# Altium footprint library Connector_SMD.PcbLib: 116 footprints (part 1 of 8)
Each footprint in its own frame and in the unit in brackets; x right, y up, seen from the top. Pads: shape width x height; smd on the part's side, far side on the other; paste and mask are expansions set on the pad; w line width, h text height; cw(c..) or ccw(c..) is an arc to the next point about the centre after c.
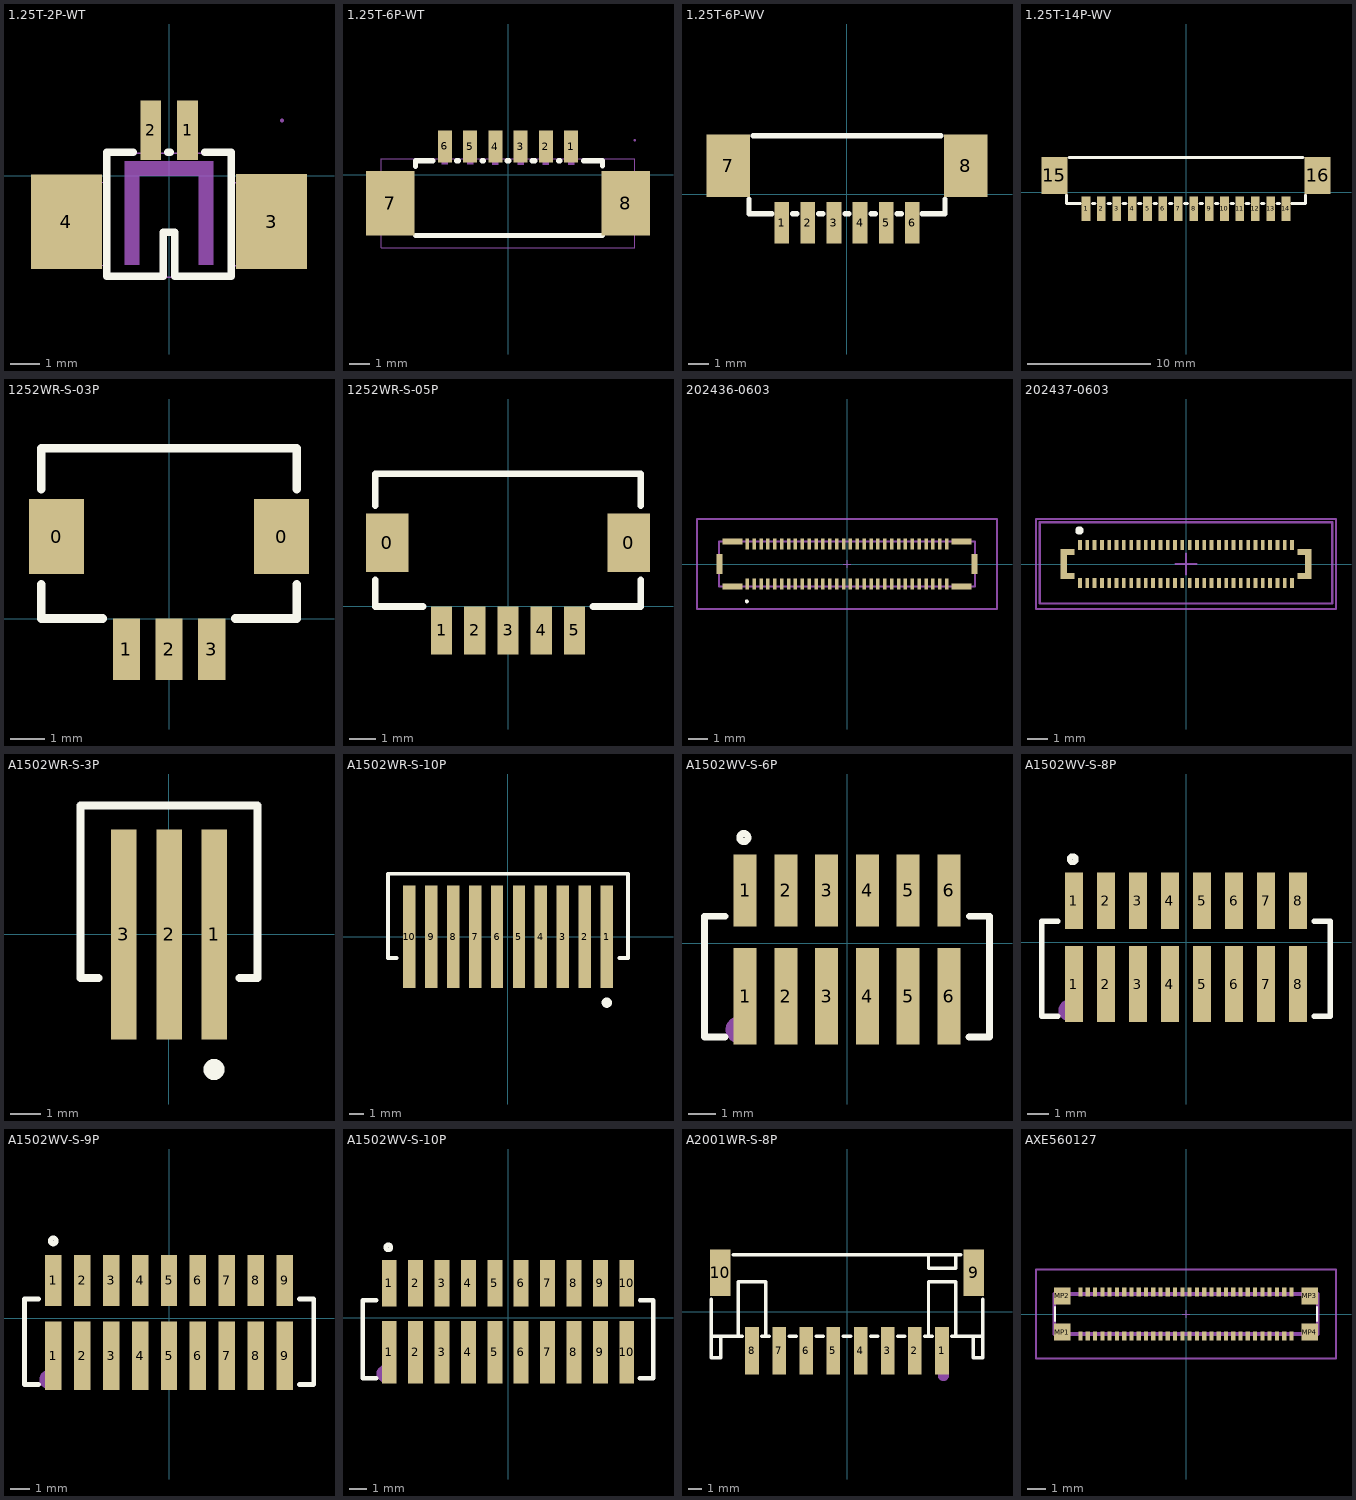
[diagram p0: the footprints below, top view; thin cyan lines are the x and y axes]

## 1.25T-2P-WT [mm]
pads (4):
  rect 0.7x2 smd paste+0 mask+0.051: 1(0.629,1.545) 2(-0.621,1.545)
  rect 2.4x3.2 smd paste+0 mask+0.051: 3(3.471,-1.544) 4(-3.471,-1.545)
Top Overlay:
  lines w0.254: -1.202,0.8 -2.1,0.8 -2.1,-3.4 -0.2,-3.4 -0.2,-1.9 0.2,-1.9 0.2,-3.4 2.1,-3.4 2.1,0.8 1.21,0.8 ; -0.04,0.8 0.047,0.8
Mechanical 6:
  region: 1,0.5 -1,0.5 -1,0 1,0
  region: -1.5,-3 -1.5,0.5 -1,0.5 -1,-3
  region: 1.5,-3 1.5,0.5 1,0.5 1,-3
Mechanical 15:
  region: -2.275,-2.373 -3.775,-2.373 -3.775,-0.473 -2.275,-0.473
  region: 3.775,-2.372 2.275,-2.372 2.275,-0.472 3.775,-0.472
  region: -0.471,0.679 -0.771,0.679 -0.771,1.879 -0.471,1.879
  region: 0.779,0.679 0.479,0.679 0.479,1.879 0.779,1.879
  region: 3.885,1.879 3.885,1.904 3.85,1.939 3.8,1.939 3.765,1.904 3.765,1.879 3.765,1.854 3.8,1.819 3.85,1.819 3.885,1.854 3.885,1.879
  lines w0.051: -2.126,-3.429 -2.126,-3.032 -3.58,-3.029 -3.627,-2.979 -3.626,-2.471 -3.697,-2.451 -3.755,-2.411 -3.797,-2.336 -3.814,-2.29 -3.826,-2.23 -3.826,-0.553 -3.815,-0.49 -3.798,-0.421 -3.756,-0.372 -3.694,-0.33 -3.632,-0.31 -3.623,-0.304 -3.623,-0.28 -3.574,-0.232 -2.131,-0.222 -2.125,0.772 2.121,0.766 2.125,-0.232 3.58,-0.23 3.629,-0.31 3.705,-0.331 3.753,-0.367 3.796,-0.42 3.825,-0.549 3.825,-2.231 3.815,-2.291 3.796,-2.352 3.754,-2.415 3.705,-2.45 3.632,-2.471 3.625,-2.473 3.625,-2.984 3.61,-2.994 3.6,-3.014 3.585,-3.025 3.555,-3.034 2.125,-3.032 2.124,-3.393 2.115,-3.411 2.102,-3.421 2.084,-3.427 0.154,-3.428 0.157,-3.429 -2.126,-3.429 ; -2.126,-3.429 -2.128,-3.429 -2.128,-3.431 -2.126,-3.431 -2.126,-3.429
3D body "CN2.stp": height 3.4, standoff 0, extent -3.825,-3.43 3.825,1.76

## 1.25T-6P-WT [mm]
pads (8):
  rect 0.7x1.6 smd paste+0 mask+0.051: 1(3.125,1.398) 2(1.875,1.398) 3(0.625,1.399) 4(-0.625,1.401) 5(-1.875,1.401) 6(-3.125,1.402)
  rect 2.4x3.2 smd paste+0 mask+0.051: 7(-5.825,-1.402) 8(5.825,-1.401)
Top Overlay:
  lines w0.254: -4.579,-3.001 4.671,-3.001 ; -4.579,0.424 -4.579,0.699 -3.71,0.699 ; -2.549,0.699 -2.455,0.699 ; -1.295,0.699 -1.208,0.699 ; -0.047,0.699 0.039,0.699 ; 1.202,0.699 1.332,0.699 ; 2.493,0.699 2.581,0.699 ; 3.742,0.699 4.671,0.699 4.671,0.431
Mechanical 15:
  region: -5.075,-2.402 -6.275,-2.402 -6.275,-0.402 -5.075,-0.402
  region: 6.275,-2.401 5.075,-2.401 5.075,-0.401 6.275,-0.401
  region: -0.475,0.511 -0.775,0.511 -0.775,1.711 -0.475,1.711
  region: -1.725,0.511 -2.025,0.511 -2.025,1.711 -1.725,1.711
  region: 3.275,0.508 2.975,0.508 2.975,1.708 3.275,1.708
  region: 2.025,0.508 1.725,0.508 1.725,1.708 2.025,1.708
  region: 0.775,0.509 0.475,0.509 0.475,1.709 0.775,1.709
  region: -2.975,0.512 -3.275,0.512 -3.275,1.712 -2.975,1.712
  region: 6.335,1.712 6.335,1.737 6.3,1.772 6.25,1.772 6.215,1.737 6.215,1.712 6.215,1.687 6.25,1.652 6.3,1.652 6.335,1.687 6.335,1.712
  lines w0.051: -6.275,-3.606 6.275,-3.606 6.275,0.794 -6.275,0.794 -6.275,-3.606
3D body "CN1.stp": height 3.4, standoff 0, extent -6.325,-3.484 6.325,1.706

## 1.25T-6P-WV [mm]
pads (8):
  rect 0.7x2 smd: 1(-3.125,-1.362) 2(-1.875,-1.362) 3(-0.625,-1.362) 4(0.625,-1.362) 5(1.875,-1.362) 6(3.125,-1.362)
  rect 2.1x3 smd: 7(-5.692,1.362) 8(5.692,1.362)
Top Overlay:
  lines w0.254: -4.7,-0.238 -4.7,-0.938 -3.6,-0.938 ; -4.5,2.8 4.5,2.8 ; -2.6,-0.938 -2.4,-0.938 ; -1.35,-0.938 -1.15,-0.938 ; -0.1,-0.938 0.1,-0.938 ; 1.15,-0.938 1.35,-0.938 ; 2.4,-0.938 2.6,-0.938 ; 3.6,-0.938 4.7,-0.938 4.7,-0.238
3D body "CN1.stp": height 4.7, standoff 0, extent -6.324,-1.337 6.324,2.762

## 1.25T-14P-WV [mm]
pads (16):
  rect 0.7x2 smd: 1(-8.125,-1.362) 2(-6.875,-1.362) 3(-5.625,-1.362) 4(-4.375,-1.362) 5(-3.125,-1.362) 6(-1.875,-1.362) 7(-0.625,-1.362) 8(0.625,-1.362) 9(1.875,-1.362) 10(3.125,-1.362) 11(4.375,-1.362) 12(5.625,-1.362) 13(6.875,-1.362) 14(8.125,-1.362)
  rect 2.1x3 smd: 15(-10.692,1.362) 16(10.692,1.362)
Top Overlay:
  lines w0.254: -9.7,-0.238 -9.7,-0.938 -8.6,-0.938 ; -9.5,2.8 9.5,2.8 ; -7.6,-0.938 -7.4,-0.938 ; -6.35,-0.938 -6.15,-0.938 ; -5.1,-0.938 -4.9,-0.938 ; -3.85,-0.938 -3.65,-0.938 ; -2.6,-0.938 -2.4,-0.938 ; -1.35,-0.938 -1.15,-0.938 ; -0.1,-0.938 0.1,-0.938 ; 1.15,-0.938 1.35,-0.938 ; 2.4,-0.938 2.6,-0.938 ; 3.65,-0.938 3.85,-0.938 ; 4.9,-0.938 5.1,-0.938 ; 6.15,-0.938 6.35,-0.938 ; 7.4,-0.938 7.6,-0.938 ; 8.6,-0.938 9.7,-0.938 9.7,-0.238
3D body "CN3.stp": height 4.5, standoff 0, extent -11.275,-1.362 11.275,2.538

## 1252WR-S-03P [mm]
pads (5):
  rect 1.6x2.2 smd: 0(-3.3,2.4) 0(3.3,2.4)
  rect 0.8x1.8 smd: 1(-1.25,-0.9) 2(0,-0.9) 3(1.25,-0.9)
Top Overlay:
  lines w0.254: -3.75,1 -3.75,0 -1.95,0 ; -3.75,3.8 -3.75,5 3.75,5 3.75,3.8 ; 1.95,0 3.75,0 3.75,1

## 1252WR-S-05P [mm]
pads (7):
  rect 1.6x2.2 smd: 0(-4.55,2.4) 0(4.55,2.4)
  rect 0.8x1.8 smd: 1(-2.5,-0.9) 2(-1.25,-0.9) 3(0,-0.9) 4(1.25,-0.9) 5(2.5,-0.9)
Top Overlay:
  lines w0.254: -5,1 -5,0 -3.2,0 ; -5,3.8 -5,5 5,5 5,3.8 ; 3.2,0 5,0 5,1

## 202436-0603 [mm]
pads (66):
  rect 0.18x0.55 smd: 1(-5.075,-1.025) 2(-5.075,1.025) 3(-4.725,-1.025) 4(-4.725,1.025) 5(-4.375,-1.025) 6(-4.375,1.025) 7(-4.025,-1.025) 8(-4.025,1.025) 9(-3.675,-1.025) 10(-3.675,1.025) 11(-3.325,-1.025) 12(-3.325,1.025) 13(-2.975,-1.025) 14(-2.975,1.025) 15(-2.625,-1.025) 16(-2.625,1.025) 17(-2.275,-1.025) 18(-2.275,1.025) 19(-1.925,-1.025) 20(-1.925,1.025) 21(-1.575,-1.025) 22(-1.575,1.025) 23(-1.225,-1.025) 24(-1.225,1.025) 25(-0.875,-1.025) 26(-0.875,1.025) 27(-0.525,-1.025) 28(-0.525,1.025) 29(-0.175,-1.025) 30(-0.175,1.025) 31(0.175,-1.025) 32(0.175,1.025) 33(0.525,-1.025) 34(0.525,1.025) 35(0.875,-1.025) 36(0.875,1.025) 37(1.225,-1.025) 38(1.225,1.025) 39(1.575,-1.025) 40(1.575,1.025) 41(1.925,-1.025) 42(1.925,1.025) 43(2.275,-1.025) 44(2.275,1.025) 45(2.625,-1.025) 46(2.625,1.025) 47(2.975,-1.025) 48(2.975,1.025) 49(3.325,-1.025) 50(3.325,1.025) 51(3.675,-1.025) 52(3.675,1.025) 53(4.025,-1.025) 54(4.025,1.025) 55(4.375,-1.025) 56(4.375,1.025) 57(4.725,-1.025) 58(4.725,1.025) 59(5.075,-1.025) 60(5.075,1.025)
  rect 1x0.3 smd: 61(5.83,-1.15) 62(5.83,1.15) 63(-5.83,-1.15) 64(-5.83,1.15)
  rect 0.3x1 smd: 65(6.485,0) 66(-6.485,0)
Top Overlay:
  lines w0.1: -5.1,-1.95 ccw(c-5.1,-1.9) -5.1,-1.85 ccw(c-5.1,-1.9) -5.1,-1.95
Mechanical 6:
  lines w0.1: -6.525,-1.15 6.525,-1.15 6.525,1.15 -6.525,1.15 -6.525,-1.15
Mechanical 7:
  lines w0.1: -7.635,-2.3 7.635,-2.3 7.635,2.3 -7.635,2.3 -7.635,-2.3
Mechanical 8:
  lines w0.025: -0.2,0 0.2,0 ; 0,-0.2 0,0.2
3D body "202436-0603.stp": height 0.88, standoff 0, extent -6.605,-1.282 6.605,1.282

## 202437-0603 [mm]
pads (66):
  rect 0.18x0.485 smd: 1(-5.075,0.908) 2(-5.075,-0.907) 3(-4.725,0.908) 4(-4.725,-0.907) 5(-4.375,0.908) 6(-4.375,-0.907) 7(-4.025,0.908) 8(-4.025,-0.907) 9(-3.675,0.908) 10(-3.675,-0.907) 11(-3.325,0.908) 12(-3.325,-0.907) 13(-2.975,0.908) 14(-2.975,-0.907) 15(-2.625,0.908) 16(-2.625,-0.907) 17(-2.275,0.908) 18(-2.275,-0.907) 19(-1.925,0.908) 20(-1.925,-0.907) 21(-1.575,0.908) 22(-1.575,-0.907) 23(-1.225,0.908) 24(-1.225,-0.907) 25(-0.875,0.908) 26(-0.875,-0.907) 27(-0.525,0.908) 28(-0.525,-0.907) 29(-0.175,0.908) 30(-0.175,-0.907) 31(0.175,0.908) 32(0.175,-0.907) 33(0.525,0.908) 34(0.525,-0.907) 35(0.875,0.908) 36(0.875,-0.907) 37(1.225,0.908) 38(1.225,-0.907) 39(1.575,0.908) 40(1.575,-0.907) 41(1.925,0.908) 42(1.925,-0.907) 43(2.275,0.908) 44(2.275,-0.907) 45(2.625,0.908) 46(2.625,-0.907) 47(2.975,0.908) 48(2.975,-0.907) 49(3.325,0.908) 50(3.325,-0.907) 51(3.675,0.908) 52(3.675,-0.907) 53(4.025,0.908) 54(4.025,-0.907) 55(4.375,0.908) 56(4.375,-0.907) 57(4.725,0.908) 58(4.725,-0.907) 59(5.075,0.908) 60(5.075,-0.907)
  rect 0.31x1.42 smd: 61(-5.85,0) 62(5.85,0)
  rect 0.36x0.28 smd: 61(-5.515,-0.57) 61(-5.515,0.57) 62(5.515,-0.57) 62(5.515,0.57)
Top Overlay:
  lines w0.2: -5.2,1.6 cw(c-5.1,1.6) -5,1.6 cw(c-5.1,1.6) -5.2,1.6
Mechanical 15:
  lines w0.1: -0.5,0 0.5,0 ; 0,-0.5 0,0.5 ; -7,-1.9 7,-1.9 7,2 -7,2 -7,-1.9
Mechanical 20:
  lines w0.1: -7.18,-2.15 -7.18,2.15 7.18,2.15 7.18,-2.15 -7.18,-2.15
3D body "202437-0603.stp": height 0.7, standoff -0.02, extent -5.855,-1 5.855,1

## A1502WR-S-3P [mm]
pads (3):
  rect 0.85x7 smd paste-1 mask+0.102: 1(1.5,0) 2(0,0) 3(-1.5,0)
Top Overlay:
  circle w0.5: c1.5,-4.5 r0.1
  lines w0.254: -2.35,-1.45 -2.95,-1.45 -2.95,4.3 2.95,4.3 2.95,-1.45 2.35,-1.45
Top Paste:
  rectangle: -1.925,-3.5 -1.075,-0.95
  rectangle: -1.925,0.05 -1.075,3.5
  rectangle: -0.425,-3.5 0.425,-0.95
  rectangle: -0.425,0.05 0.425,3.5
  rectangle: 1.075,0.05 1.925,3.5
  rectangle: 1.075,-3.5 1.925,-0.95
Top Solder:
  rectangle: 0.975,-3.6 2.025,-0.85
  rectangle: 0.975,-0.05 2.025,3.6
  rectangle: -0.525,-0.05 0.525,3.6
  rectangle: -0.525,-3.6 0.525,-0.85
  rectangle: -2.025,-0.05 -0.975,3.6
  rectangle: -2.025,-3.6 -0.975,-0.85

## A1502WR-S-10P [mm]
pads (10):
  rect 0.85x7 smd paste-1 mask+0.102: 1(6.75,0)
  rect 0.85x7 smd paste-1: 2(5.25,0) 3(3.75,0) 4(2.25,0) 5(0.75,0) 6(-0.75,0) 7(-2.25,0) 8(-3.75,0) 9(-5.25,0) 10(-6.75,0)
Top Overlay:
  circle w0.5: c6.75,-4.5 r0.1
  lines w0.254: -7.6,-1.45 -8.2,-1.45 -8.2,4.3 8.2,4.3 8.2,-1.45 7.6,-1.45
Top Paste:
  rectangle: -7.175,-3.5 -6.325,-0.95
  rectangle: -7.175,0.05 -6.325,3.5
  rectangle: -5.675,-3.5 -4.825,-0.95
  rectangle: -5.675,0.05 -4.825,3.5
  rectangle: -4.175,-3.5 -3.325,-0.95
  rectangle: -4.175,0.05 -3.325,3.5
  rectangle: -2.675,-3.5 -1.825,-0.95
  rectangle: -2.675,0.05 -1.825,3.5
  rectangle: -1.175,-3.5 -0.325,-0.95
  rectangle: -1.175,0.05 -0.325,3.5
  rectangle: 0.325,-3.5 1.175,-0.95
  rectangle: 0.325,0.05 1.175,3.5
  rectangle: 1.825,-3.5 2.675,-0.95
  rectangle: 1.825,0.05 2.675,3.5
  rectangle: 3.325,-3.5 4.175,-0.95
  rectangle: 3.325,0.05 4.175,3.5
  rectangle: 4.825,-3.5 5.675,-0.95
  rectangle: 4.825,0.05 5.675,3.5
  rectangle: 6.325,0.05 7.175,3.5
  rectangle: 6.325,-3.5 7.175,-0.95
Top Solder:
  rectangle: 6.225,-3.6 7.275,-0.85
  rectangle: 6.225,-0.05 7.275,3.6
  rectangle: 4.725,-0.05 5.775,3.6
  rectangle: 4.725,-3.6 5.775,-0.85
  rectangle: 3.225,-0.05 4.275,3.6
  rectangle: 3.225,-3.6 4.275,-0.85
  rectangle: 1.725,-0.05 2.775,3.6
  rectangle: 1.725,-3.6 2.775,-0.85
  rectangle: 0.225,-0.05 1.275,3.6
  rectangle: 0.225,-3.6 1.275,-0.85
  rectangle: -1.275,-0.05 -0.225,3.6
  rectangle: -1.275,-3.6 -0.225,-0.85
  rectangle: -2.775,-0.05 -1.725,3.6
  rectangle: -2.775,-3.6 -1.725,-0.85
  rectangle: -4.275,-0.05 -3.225,3.6
  rectangle: -4.275,-3.6 -3.225,-0.85
  rectangle: -5.775,-0.05 -4.725,3.6
  rectangle: -5.775,-3.6 -4.725,-0.85
  region: -6.225,3.6 -7.275,3.6 -7.275,-0.05 -6.225,-0.05
  region: -6.225,-0.85 -7.275,-0.85 -7.275,-3.6 -6.225,-3.6
3D body "CONN-SMD_10P-P1.50_A1502WR-S-10P.stp": height 4.46, standoff 0, extent -8.15,-3.126 8.15,4.624

## A1502WV-S-6P [mm]
pads (12):
  rect 0.85x3.55 smd: 1(-3.75,-1.95) 2(-2.25,-1.95) 3(-0.75,-1.95) 4(0.75,-1.95) 5(2.25,-1.95) 6(3.75,-1.95)
  rect 0.85x2.65 smd: 1(-3.75,1.95) 2(-2.25,1.95) 3(-0.75,1.95) 4(0.75,1.95) 5(2.25,1.95) 6(3.75,1.95)
Top Overlay:
  circle w0.254: c-3.8,3.9 r0.15
  lines w0.254: -4.5,-3.45 -5.25,-3.45 -5.25,1 -4.5,1 ; 4.5,-3.45 5.251,-3.451 5.251,1 4.501,1
Mechanical 15:
  circle w0.5: c-3.97,-3.18 r0.25
3D body "CN2.stp": height 5.76, standoff 0, extent -5.15,-3.399 5.15,2.601

## A1502WV-S-8P [mm]
pads (16):
  rect 0.85x3.55 smd: 1(-5.25,-1.95) 2(-3.75,-1.95) 3(-2.25,-1.95) 4(-0.75,-1.95) 5(0.75,-1.95) 6(2.25,-1.95) 7(3.75,-1.95) 8(5.25,-1.95)
  rect 0.85x2.65 smd: 1(-5.25,1.95) 2(-3.75,1.95) 3(-2.25,1.95) 4(-0.75,1.95) 5(0.75,1.95) 6(2.25,1.95) 7(3.75,1.95) 8(5.25,1.95)
Top Overlay:
  circle w0.254: c-5.3,3.9 r0.15
  lines w0.254: -6,-3.45 -6.75,-3.45 -6.75,1 -6,1 ; 6,-3.45 6.751,-3.451 6.751,1 6.001,1
Mechanical 15:
  circle w0.5: c-5.47,-3.18 r0.25
3D body "CN1.stp": height 5.76, standoff 0, extent -6.65,-3.401 6.65,2.6

## A1502WV-S-9P [mm]
pads (18):
  rect 0.85x3.55 smd: 1(-6,-1.95) 2(-4.5,-1.95) 3(-3,-1.95) 4(-1.5,-1.95) 5(0,-1.95) 6(1.5,-1.95) 7(3,-1.95) 8(4.5,-1.95) 9(6,-1.95)
  rect 0.85x2.65 smd: 1(-6,1.95) 2(-4.5,1.95) 3(-3,1.95) 4(-1.5,1.95) 5(0,1.95) 6(1.5,1.95) 7(3,1.95) 8(4.5,1.95) 9(6,1.95)
Top Overlay:
  circle w0.254: c-6,4 r0.15
  lines w0.254: -6.75,-3.45 -7.5,-3.45 -7.5,1 -6.75,1 ; 6.75,-3.45 7.501,-3.451 7.501,1 6.751,1
Mechanical 15:
  circle w0.5: c-6.22,-3.18 r0.25
3D body "CN1.stp": height 5.77, standoff 0, extent -7.4,-3.475 7.4,2.576

## A1502WV-S-10P [mm]
pads (20):
  rect 0.85x3.55 smd: 1(-6.75,-1.95) 2(-5.25,-1.95) 3(-3.75,-1.95) 4(-2.25,-1.95) 5(-0.75,-1.95) 6(0.75,-1.95) 7(2.25,-1.95) 8(3.75,-1.95) 9(5.25,-1.95) 10(6.75,-1.95)
  rect 0.85x2.65 smd: 1(-6.75,1.95) 2(-5.25,1.95) 3(-3.75,1.95) 4(-2.25,1.95) 5(-0.75,1.95) 6(0.75,1.95) 7(2.25,1.95) 8(3.75,1.95) 9(5.25,1.95) 10(6.75,1.95)
Top Overlay:
  circle w0.254: c-6.8,4 r0.15
  lines w0.254: -7.5,-3.45 -8.25,-3.45 -8.25,1 -7.5,1 ; 7.5,-3.45 8.251,-3.451 8.251,1 7.501,1
Mechanical 15:
  circle w0.5: c-6.97,-3.18 r0.25
3D body "U2.stp": height 5.76, standoff 0, extent -8.149,-3.4 8.149,2.6

## A2001WR-S-8P [mm]
pads (10):
  rect 1x3.5 smd: 1(7.001,-2.875) 2(5.001,-2.875) 3(3.001,-2.875) 4(1.001,-2.875) 5(-1,-2.871) 6(-2.999,-2.874) 7(-5,-2.874) 8(-6.999,-2.875)
  rect 1.5x3.4 smd: 9(9.351,2.875) 10(-9.351,2.875)
Top Overlay:
  lines w0.254: -10,-1.9 -10,0.944 ; -9.3,-1.8 -9.3,-3.4 -10,-3.4 -10,-1.8 -7.73,-1.8 ; -8.37,4.2 8.37,4.2 ; -8,-1.798 -8,2.202 -6,2.202 -6,-1.798 ; -6.268,-1.8 -5.731,-1.8 ; -4.269,-1.8 -3.73,-1.8 ; -2.268,-1.8 -1.731,-1.8 ; -0.269,-1.8 0.27,-1.8 ; 1.732,-1.8 2.27,-1.8 ; 3.732,-1.8 4.27,-1.8 ; 5.732,-1.8 6.27,-1.8 ; 6.004,-1.803 6.004,2.197 8.004,2.197 8.004,-1.803 ; 6.004,4.197 6.004,3.197 8.004,3.197 8.004,4.197 ; 7.732,-1.8 10.003,-1.8 ; 9.317,-1.8 9.3,-1.8 9.3,-3.4 10.003,-3.4 10.003,-1.8 ; 10.003,0.944 10.003,-1.8
Mechanical 15:
  circle w0.4: c7.1,-4.7 r0.2
3D body "CN1.stp": height 5.5, standoff 0, extent -10,-4.325 10,4.275

## AXE560127 [mm]
pads (64):
  rect 0.23x0.5 smd: 1(-5.8,-1.2) 2(-5.8,1.2) 3(-5.4,-1.2) 4(-5.4,1.2) 5(-5,-1.2) 6(-5,1.2) 7(-4.6,-1.2) 8(-4.6,1.2) 9(-4.2,-1.2) 10(-4.2,1.2) 11(-3.8,-1.2) 12(-3.8,1.2) 13(-3.4,-1.2) 14(-3.4,1.2) 15(-3,-1.2) 16(-3,1.2) 17(-2.6,-1.2) 18(-2.6,1.2) 19(-2.2,-1.2) 20(-2.2,1.2) 21(-1.8,-1.2) 22(-1.8,1.2) 23(-1.4,-1.2) 24(-1.4,1.2) 25(-1,-1.2) 26(-1,1.2) 27(-0.6,-1.2) 28(-0.6,1.2) 29(-0.2,-1.2) 30(-0.2,1.2) 31(0.2,-1.2) 32(0.2,1.2) 33(0.6,-1.2) 34(0.6,1.2) 35(1,-1.2) 36(1,1.2) 37(1.4,-1.2) 38(1.4,1.2) 39(1.8,-1.2) 40(1.8,1.2) 41(2.2,-1.2) 42(2.2,1.2) 43(2.6,-1.2) 44(2.6,1.2) 45(3,-1.2) 46(3,1.2) 47(3.4,-1.2) 48(3.4,1.2) 49(3.8,-1.2) 50(3.8,1.2) 51(4.2,-1.2) 52(4.2,1.2) 53(4.6,-1.2) 54(4.6,1.2) 55(5,-1.2) 56(5,1.2) 57(5.4,-1.2) 58(5.4,1.2) 59(5.8,-1.2) 60(5.8,1.2)
  rect 0.9x0.92 smd: MP1(-6.8,-0.99) MP2(-6.8,0.99) MP3(6.8,0.99) MP4(6.8,-0.99)
Top Overlay:
  lines w0.1: -7.2,-0.4 -7.2,0.4 ; 7.2,-0.4 7.2,0.4
Mechanical 6:
  lines w0.2: -7.25,-1.1 -7.25,1.1 7.25,1.1 7.25,-1.1 -7.25,-1.1
Mechanical 7:
  lines w0.1: -8.25,-2.45 -8.25,2.45 8.25,2.45 8.25,-2.45 -8.25,-2.45
Mechanical 8:
  lines w0.025: -0.2,0 0.2,0 ; 0,-0.2 0,0.2
3D body "AXE560127.stp": height 0.77, standoff 0, extent -7.25,-1.25 7.25,1.25